# Altium schematic symbol library MOV.SchLib: 1 symbol
Pins are listed as number, name and electrical type; pins without a type are passive.

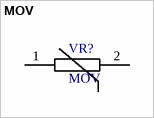
[diagram p0: symbol MOV]

## MOV
designator VR?
Metal Oxide Varistor
footprint V275LA40A (Metal Oxide Varistor)
pins: 1, 2